# Altium schematic symbol library 953363-1.SchLib: 1 symbol
Pins are listed as number, name and electrical type; pins without a type are passive.

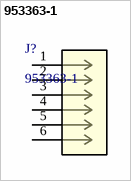
[diagram p0: symbol 953363-1]

## 953363-1
designator J?
6pos MQS .63 header 180deg; Manufacturer_Name: TE Connectivity; TYPE: -; Copyright: Copyright (C) 2026 Ultra Librarian. All rights reserved.; Manufacturer_Part_Number: 953363-1; Datasheet: https://www.te.com/commerce/DocumentDelivery/DDEController?Action=srchrtrv&DocNm=108-15199&DocType=Specification+Or+Standard&DocLang=English&PartCntxt=953363-3&DocFormat=pdf; RefDes: RefDes
footprint CONN6_953363-1_TEC
pins: 1, 2, 3, 4, 5, 6